# Altium footprint library Power_Embedded_Board_Library.PcbLib: 34 footprints (part 3 of 3)
Each footprint in its own frame and in the unit in brackets; x right, y up, seen from the top. Pads: shape width x height; smd on the part's side, far side on the other; paste and mask are expansions set on the pad; w line width, h text height; cw(c..) or ccw(c..) is an arc to the next point about the centre after c.
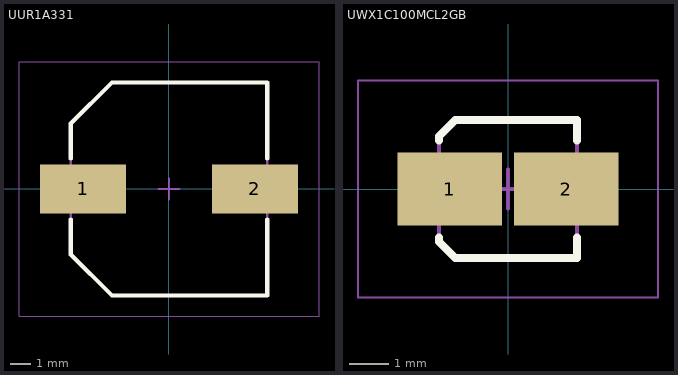
[diagram p2: the footprints below, top view; thin cyan lines are the x and y axes]

## UUR1A331 [mm] "Aluminum Electrolytic Capacitor, Body 9.50x10.30x10.30mm, IPC Low Density"
height 10.3
pads (2):
  rect 4.15x2.35 smd: 1(-4.15,0) 2(4.15,0)
Top Overlay:
  lines w0.2: -4.75,-1.475 -4.75,-3.163 -2.762,-5.15 4.75,-5.15 4.75,-1.475 ; -4.75,1.475 -4.75,3.162 -2.762,5.15 4.75,5.15 4.75,1.475
Mechanical 13:
  lines w0.1: -4.75,-3.163 -2.762,-5.15 4.75,-5.15 4.75,5.15 -2.762,5.15 -4.75,3.162 -4.75,-3.163
Mechanical 15:
  lines w0.05: -7.25,-6.15 -7.25,6.15 7.25,6.15 7.25,-6.15 -7.25,-6.15
  lines w0.1: -0.5,0 0.5,0 ; 0,-0.5 0,0.5
3D body: height 3.44, standoff 0, extent -4.75,-5.15 4.75,5.15
3D body: height 10.3, standoff 0, extent -4,-4 4,3.994

## UWX1C100MCL2GB [mm] "Aluminum Electrolytic Capacitor, Body 3.30x3.30x5.50mm, IPC Low Density"
height 5.5
pads (2):
  rect 2.65x1.85 smd: 1(-1.475,0) 2(1.475,0)
Top Overlay:
  lines w0.2: -1.75,-1.225 -1.75,-1.338 -1.338,-1.75 1.75,-1.75 1.75,-1.225 ; -1.75,1.225 -1.75,1.338 -1.338,1.75 1.75,1.75 1.75,1.225
Mechanical 13:
  lines w0.1: -1.75,-1.338 -1.338,-1.75 1.75,-1.75 1.75,1.75 -1.338,1.75 -1.75,1.338 -1.75,-1.338
Mechanical 15:
  lines w0.05: -3.8,-2.75 -3.8,2.75 3.8,2.75 3.8,-2.75 -3.8,-2.75
  lines w0.1: -0.5,0 0.5,0 ; 0,-0.5 0,0.5
3D body: height 1.84, standoff 0, extent -1.75,-1.75 1.75,1.75
3D body: height 5.5, standoff 0, extent -1.75,-1.75 1.75,1.75